# Altium integrated library ERA6VRB4702V.IntLib: 1 symbol
Pins are listed as number, name and electrical type; pins without a type are passive.

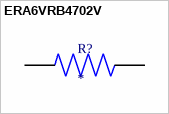
[diagram p0: symbol ERA6VRB4702V]

## ERA6VRB4702V
designator R?
MP: ERA6VRB4702V; Package: None; Price: None; Availability: Unavailable; Value: *
footprint RES_ERA6VRB4702V
pins: 1, 2